# Altium schematic symbol library ESP-pc-4140.SchLib: 9 symbols
Pins are listed as number, name and electrical type; pins without a type are passive.

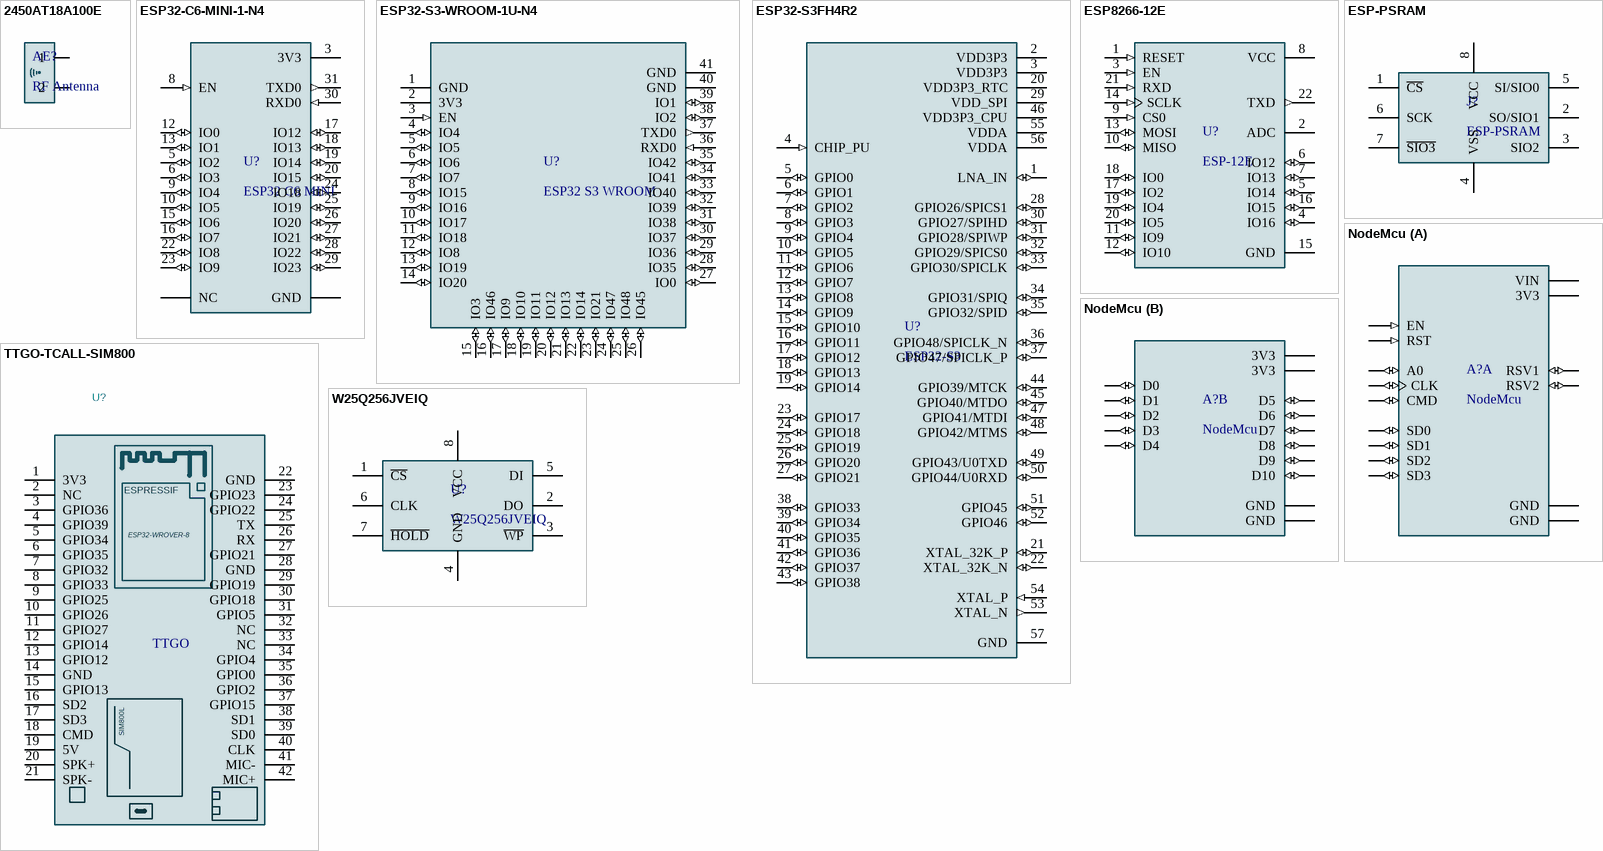
[diagram p0: symbols 2450AT18A100E to W25Q256JVEIQ]

## 2450AT18A100E
designator AE?, comment RF Antenna
2.4GHz - Chip RF Antenna 2.4GHz ~ 2.5GHz 0.5dBi Solder Surface Mount; MF: Johanson Technology; MP: 2450AT18A100E; SnapEDA_Link: https://www.snapeda.com/parts/2450AT18A100E/Johanson/view-part/?ref=snap; Package: Package; Value: *; Check_prices: https://www.snapeda.com/parts/2450AT18A100E/Johanson/view-part/?ref=eda
footprint Chip RF Antenna 2.4GHz (ANTC3216X140N)
pins: 1, 2

## ESP32-C6-MINI-1-N4
designator U?, comment ESP32 C6 MINI
ESP32-C6-MINI-1-N4; MF: Espressif Systems; SnapEDA_Link: https://www.snapeda.com/parts/ESP32-C6-MINI-1-N4/Espressif+Systems/view-part/?ref=snap; Package: SMD-53 Espressif Systems; Value: *; MP: ESP32-C6-MINI-1-N4; Check_prices: https://www.snapeda.com/parts/ESP32-C6-MINI-1-N4/Espressif+Systems/view-part/?ref=eda
footprint ESP32 C6 MINI (ESP32-C6-MINI-1-N4)
pins: 3 3V3 (power), 5 IO2 (io), 6 IO3 (io), 8 EN (in), 9 IO4 (io), 10 IO5 (io), 12 IO0 (io), 13 IO1 (io), 15 IO6 (io), 16 IO7 (io), 17 IO12 (io), 18 IO13 (io), 19 IO14 (io), 20 IO15 (io), 22 IO8 (io), 23 IO9 (io), 24 IO18 (io), 25 IO19 (io), 26 IO20 (io), 27 IO21 (io), 28 IO22 (io), 29 IO23 (io), 30 RXD0 (in), 31 TXD0 (out), GND (power), NC

## ESP32-S3-WROOM-1U-N4
designator U?, comment ESP32 S3 WROOM
ESP32-S3-WROOM-1U-N4; MF: {'manufacturer': u'Espressif Systems'}; Package: None; Price: None; Value: *; MP: ESP32-S3-WROOM-1U-N4; Availability: Unavailable
footprint ESP32 S3 WROOM (ESP32-S3-WROOM-1U-N4)
pins: 1 GND (power), 2 3V3 (power), 3 EN (in), 4 IO4 (io), 5 IO5 (io), 6 IO6 (io), 7 IO7 (io), 8 IO15 (io), 9 IO16 (io), 10 IO17 (io), 11 IO18 (io), 12 IO8 (io), 13 IO19 (io), 14 IO20 (io), 15 IO3 (io), 16 IO46 (io), 17 IO9 (io), 18 IO10 (io), 19 IO11 (io), 20 IO12 (io), 21 IO13 (io), 22 IO14 (io), 23 IO21 (io), 24 IO47 (io), 25 IO48 (io), 26 IO45 (io), 27 IO0 (io), 28 IO35 (io), 29 IO36 (io), 30 IO37 (io), 31 IO38 (io), 32 IO39 (io), 33 IO40 (io), 34 IO41 (io), 35 IO42 (io), 36 RXD0 (in), 37 TXD0 (out), 38 IO2 (io), 39 IO1 (io), 40 GND (power), 41 GND (power)

## ESP32-S3FH4R2
designator U?, comment ESP32-S3
RF System on a Chip - SoC SMD IC ESP32-S3FH4R2, dual-core MCU, Wi-Fi 2.4G & BLE 5.0 combo, 4 MB flash and 2 MB PSRAM inside, QFN 56-pin, 7*7 mm; MF: Espressif Systems; SnapEDA_Link: https://www.snapeda.com/parts/ESP32-S3FH4R2/Espressif+Systems/view-part/?ref=snap; Package: None; Value: ESP32-S3FH4R2; MP: ESP32-S3FH4R2; Check_prices: https://www.snapeda.com/parts/ESP32-S3FH4R2/Espressif+Systems/view-part/?ref=eda
footprint ESP32-S3FH4R2 (QFN40P700X700X90-57N)
pins: 1 LNA_IN (io), 2 VDD3P3 (power), 3 VDD3P3 (power), 4 CHIP_PU (in), 5 GPIO0 (io), 6 GPIO1 (io), 7 GPIO2 (io), 8 GPIO3 (io), 9 GPIO4 (io), 10 GPIO5 (io), 11 GPIO6 (io), 12 GPIO7 (io), 13 GPIO8 (io), 14 GPIO9 (io), 15 GPIO10 (io), 16 GPIO11 (io), 17 GPIO12 (io), 18 GPIO13 (io), 19 GPIO14 (io), 20 VDD3P3_RTC (power), 21 XTAL_32K_P (io), 22 XTAL_32K_N (io), 23 GPIO17 (io), 24 GPIO18 (io), 25 GPIO19 (io), 26 GPIO20 (io), 27 GPIO21 (io), 28 GPIO26/SPICS1 (io), 29 VDD_SPI (power), 30 GPIO27/SPIHD (io), 31 GPIO28/SPIWP (io), 32 GPIO29/SPICS0 (io), 33 GPIO30/SPICLK (io), 34 GPIO31/SPIQ (io), 35 GPIO32/SPID (io), 36 GPIO48/SPICLK_N (io), 37 GPIO47/SPICLK_P (io), 38 GPIO33 (io), 39 GPIO34 (io), 40 GPIO35 (io), 41 GPIO36 (io), 42 GPIO37 (io), 43 GPIO38 (io), 44 GPIO39/MTCK (io), 45 GPIO40/MTDO (io), 46 VDD3P3_CPU (power), 47 GPIO41/MTDI (io), 48 GPIO42/MTMS (io), 49 GPIO43/U0TXD (io), 50 GPIO44/U0RXD (io), 51 GPIO45 (io), 52 GPIO46 (io), 53 XTAL_N (out), 54 XTAL_P (in), 55 VDDA (power), 56 VDDA (power), 57 GND (power)

## ESP8266-12E
designator U?, comment ESP-12E
This WiFi module has a 32-bit MCU micro and clock speeds supporting 80 MHz or 160 MHz. Supports the RTOS and integrated Wi-Fi MAC/BB/RF/PA/LNA, and has an on-board antenna.; MF: AI-Thinker; MP: ESP8266-12E/ESP-12E; Value: *; SnapEDA_Link: https://www.snapeda.com/parts/ESP8266-12E/ESP-12E/AI-Thinker/view-part/?ref=snap; Availability: Not in stock; Price: None; Package: None; Check_prices: https://www.snapeda.com/parts/ESP8266-12E/ESP-12E/AI-Thinker/view-part/?ref=eda
footprint ESP-12E (ESP8266-12E/ESP-12E)
pins: 1 RESET (in), 2 ADC, 3 EN (in), 4 IO16 (io), 5 IO14 (io), 6 IO12 (io), 7 IO13 (io), 8 VCC (power), 9 CS0 (in), 10 MISO (io), 11 IO9 (io), 12 IO10 (io), 13 MOSI (io), 14 SCLK (in), 15 GND (power), 16 IO15 (io), 17 IO2 (io), 18 IO0 (io), 19 IO4 (io), 20 IO5 (io), 21 RXD (in), 22 TXD (out)

## ESP-PSRAM
designator J?
ESP-PSRAM64H is 64Mbit serial pseudo SRAM device that is organized in 8Mx8 bits. It is fabricated using the high-performance and high-reliability CMOS technology; MP: 23LC512T-I/SN; MF: Microchip; Availability: In Stock; SnapEDA_Link: https://www.snapeda.com/parts/23LC512T-I/SN/Microchip/view-part/?ref=snap; Value: *; Package: SO-8 Microchip; Price: None; Purchase-URL: https://pricing.snapeda.com/search/part/23LC512T-I/SN/?ref=eda; Check_prices: https://www.snapeda.com/parts/23LC512T-I/SN/Microchip/view-part/?ref=eda
footprint ESP-PSRAM (SO08)
pins: 1 ~{CS}, 2 SO/SIO1, 3 SIO2, 4 VSS, 5 SI/SIO0, 6 SCK, 7 ~{SIO3}, 8 VCC

## NodeMcu
designator A?
NodeMCU- ESP8266 Transceiver; 802.11 b/g (Wi-Fi, WiFi, WLAN) 2.4GHz Evaluation Board; MP: 113990105; MF: Seeed Technology Co., Ltd; Price: None; Availability: In Stock; Package: None; SnapEDA_Link: https://www.snapeda.com/parts/113990105/Seeed+Technology+Co.%252C+Ltd/view-part/?ref=snap; Check_prices: https://www.snapeda.com/parts/113990105/Seeed+Technology+Co.%252C+Ltd/view-part/?ref=eda; Value: *; Purchase-URL: https://pricing.snapeda.com/search/part/113990105/?ref=eda
footprint NodeMcu
part A pins: J1_1 A0 (io), J1_2 RSV1 (io), J1_3 RSV2 (io), J1_4 SD3 (io), J1_5 SD2 (io), J1_6 SD1 (io), J1_7 CMD (io), J1_8 SD0 (io), J1_9 CLK (io), J1_10 GND (power), J1_11 3V3 (power), J1_12 EN (in), J1_13 RST (in), J1_14 GND (power), J1_15 VIN (power)
part B pins: J2_1 D0 (io), J2_2 D1 (io), J2_3 D2 (io), J2_4 D3 (io), J2_5 D4 (io), J2_6 3V3 (power), J2_7 GND (power), J2_8 D5 (io), J2_9 D6 (io), J2_10 D7 (io), J2_11 D8 (io), J2_12 D9 (io), J2_13 D10 (io), J2_14 GND (power), J2_15 3V3 (power)

## TTGO-TCALL-SIM800
designator U?, comment TTGO
LilyGo T-Call SIM800; Footprint: TTGO-TCALL-SIM800:TTGO-TCALL-SIM800
footprint TTGO-TCALL-SIM800
footprint TTGO-TCALL-SIM800-SMD
pins: 1 3V3 (power), 2 NC (power), 3 GPIO36 (power), 4 GPIO39 (power), 5 GPIO34 (power), 6 GPIO35 (power), 7 GPIO32 (power), 8 GPIO33 (power), 9 GPIO25 (power), 10 GPIO26 (power), 11 GPIO27 (power), 12 GPIO14 (power), 13 GPIO12 (power), 14 GND (power), 15 GPIO13 (power), 16 SD2 (power), 17 SD3 (power), 18 CMD (power), 19 5V (power), 20 SPK+ (power), 21 SPK- (power), 22 GND (power), 23 GPIO23 (power), 24 GPIO22 (power), 25 TX (power), 26 RX (power), 27 GPIO21 (power), 28 GND (power), 29 GPIO19 (power), 30 GPIO18 (power), 31 GPIO5 (power), 32 NC (power), 33 NC (power), 34 GPIO4 (power), 35 GPIO0 (power), 36 GPIO2 (power), 37 GPIO15 (power), 38 SD1 (power), 39 SD0 (power), 40 CLK (power), 41 MIC- (power), 42 MIC+ (power)
text: ESPRESSIF; ESP32-WROVER-8; SIM800L

## W25Q256JVEIQ
designator U?
3V 256MBit Serial Flash Memory with Dual, Quad SPI; MP: W25Q256JVEIQ TR; MF: Winbond; Price: None; Purchase-URL: https://pricing.snapeda.com/search/part/W25Q256JVEIQ TR/?ref=eda; Package: WSON-8 Winbond; Check_prices: https://www.snapeda.com/parts/W25Q256JVEIQ%20TR/Winbond+Electronics/view-part/?ref=eda; Value: *; Availability: In Stock; SnapEDA_Link: https://www.snapeda.com/parts/W25Q256JVEIQ%20TR/Winbond+Electronics/view-part/?ref=snap
footprint W25Q256JVEIQ (SON127P600X800X80-9N)
pins: 1 ~{CS}, 2 DO, 3 ~{WP}, 4 GND (power), 5 DI, 6 CLK, 7 ~{HOLD}, 8 VCC (power), 9 EXP